# Altium schematic symbol library Connector.SchLib: 208 symbols (part 4 of 4)
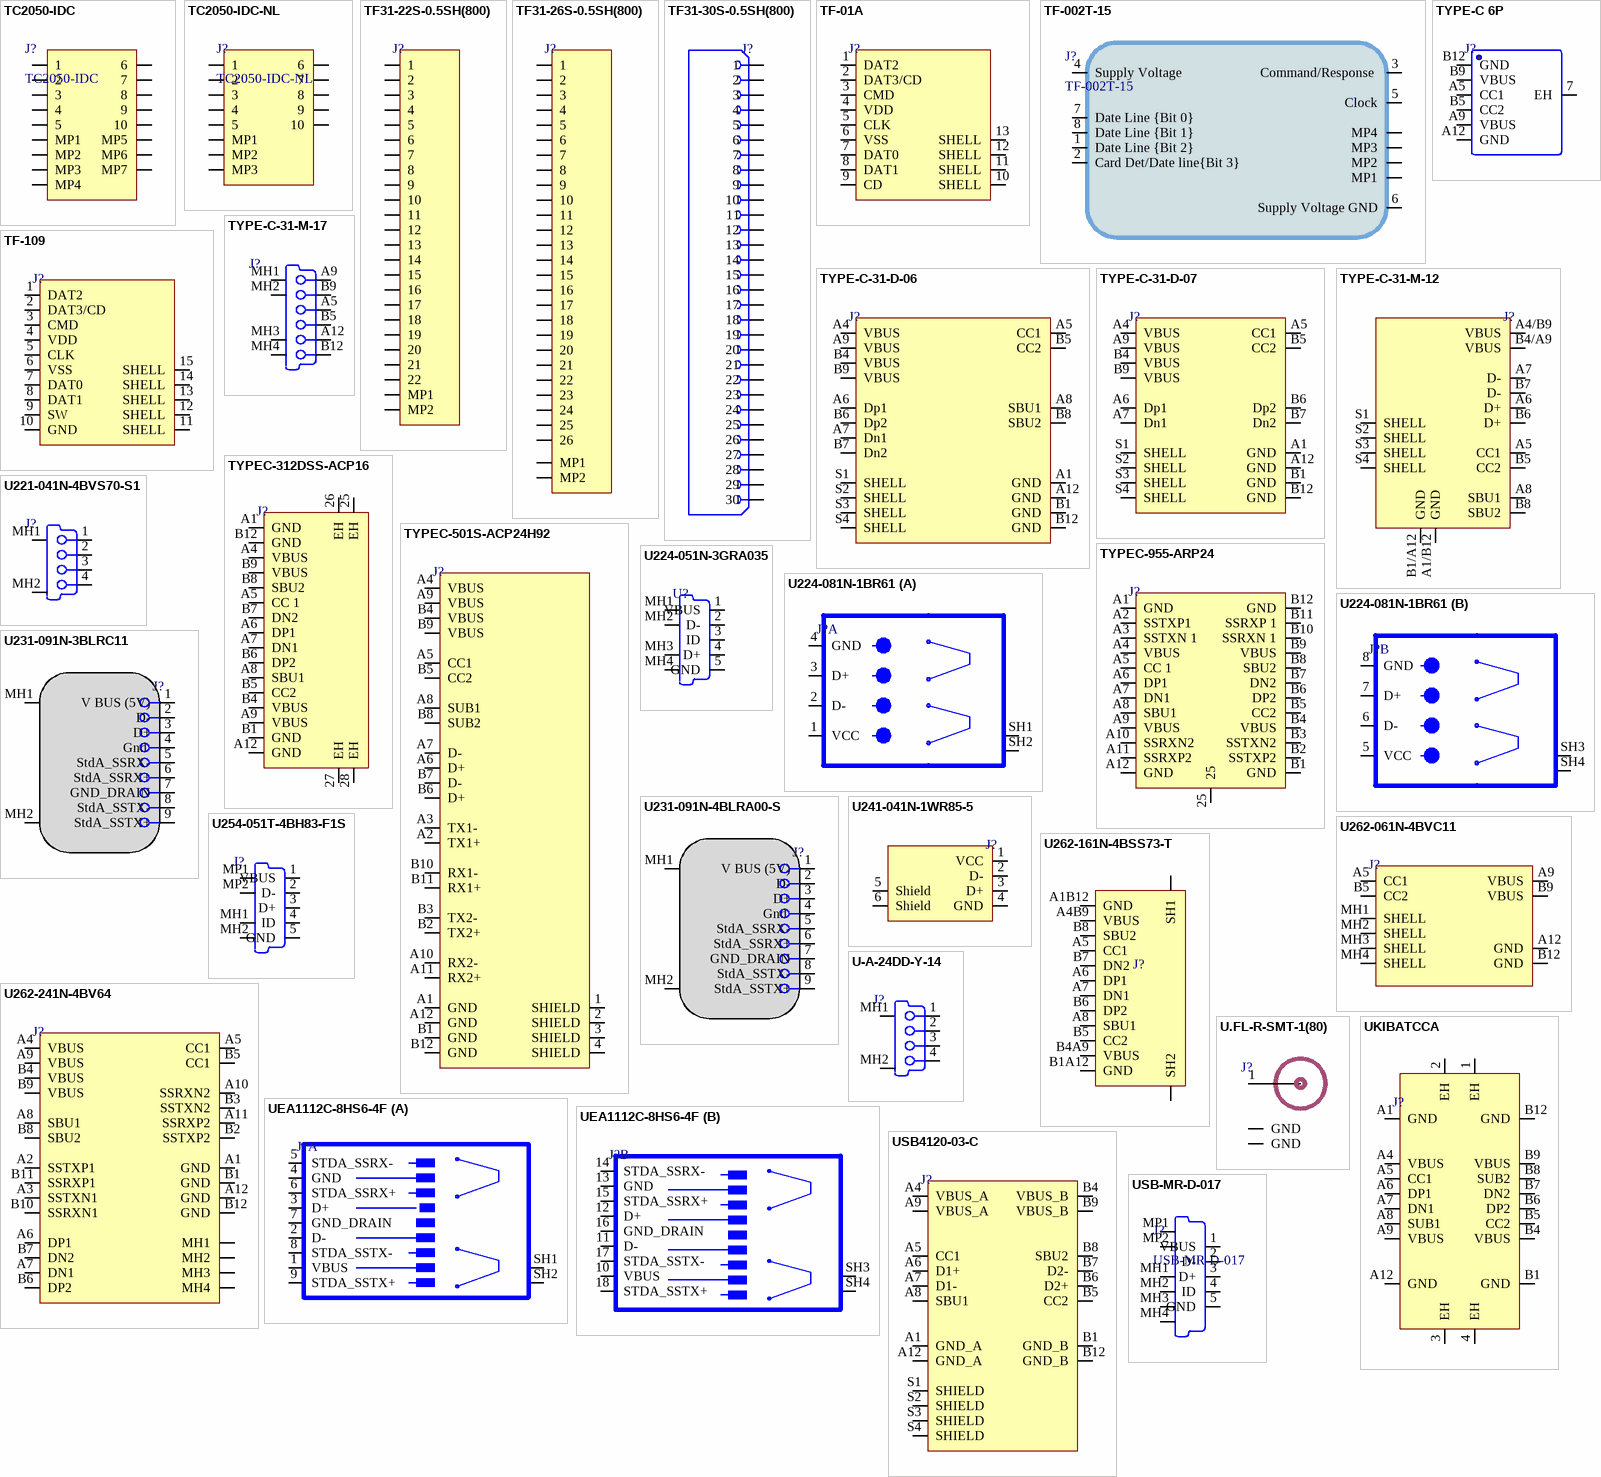
[diagram p11: symbols TC2050-IDC to USB-MR-D-017]

## TYPEC-312DSS-ACP16
designator J?
USB 3.1 5A 1 260℃ Surface Mount 16P Female -45℃~+85℃ Type-C SMD USB Connectors ROHS; Manufacturer: XUNPU; Manufacturer Part Number: TYPEC-312DSS-ACP16; Package: Custom; LCSC Part Number: C2909601; Item Type: Type-C SMD USB; ComponentLink1Description: LCSC; ComponentLink1URL: https://www.lcsc.com/product-detail/USB-Connectors_XUNPU-TYPEC-312DSS-ACP16_C2909601.html
footprint TYPEC-312DSS-ACP16
pins: 25 EH, 26 EH, 27 EH, 28 EH, A1 GND, A4 VBUS, A5 CC 1, A6 DP1, A7 DN1, A8 SBU1, A9 VBUS, A12 GND, B1 GND, B4 VBUS, B5 CC2, B6 DP2, B7 DN2, B8 SBU2, B9 VBUS, B12 GND

## TYPEC-501S-ACP24H92
designator J?
5A USB 3.1 1 260℃ Brick nogging 24P Female -45℃~+85℃ Type-C SMD USB Connectors ROHS; Manufacturer: XUNPU; Manufacturer Part Number: TYPEC-501S-ACP24H92; Package: SMD; LCSC Part Number: C2840394; Item Type: Type-C SMD USB Connector; ComponentLink1Description: LCSC; ComponentLink1URL: https://www.lcsc.com/product-detail/USB-Connectors_XUNPU-TYPEC-501S-ACP24H92_C2840394.html
footprint TYPEC-501S-ACP24H92
pins: 1 SHIELD, 2 SHIELD, 3 SHIELD, 4 SHIELD, A1 GND, A2 TX1+, A3 TX1-, A4 VBUS, A5 CC1, A6 D+, A7 D-, A8 SUB1, A9 VBUS, A10 RX2-, A11 RX2+, A12 GND, B1 GND, B2 TX2+, B3 TX2-, B4 VBUS, B5 CC2, B6 D+, B7 D-, B8 SUB2, B9 VBUS, B10 RX1-, B11 RX1+, B12 GND

## TYPEC-955-ARP24
designator J?
USB 3.1 3A 1 260℃ Board Edge, Straddle Mount 24P Male -25℃~+85℃ Type-C SMD USB Connectors ROHS; Manufacturer: XUNPU; Manufacturer Part Number: TYPEC-955-ARP24; Item Type: Type-C Connector; Package: SMD; LCSC Part Number: C2895018
footprint TYPEC-955-ARP24
pins: 25, A1 GND, A2 SSTXP1, A3 SSTXN 1, A4 VBUS, A5 CC 1, A6 DP1, A7 DN1, A8 SBU1, A9 VBUS, A10 SSRXN2, A11 SSRXP2, A12 GND, B1 GND, B2 SSTXP2, B3 SSTXN2, B4 VBUS, B5 CC2, B6 DP2, B7 DN2, B8 SBU2, B9 VBUS, B10 SSRXN 1, B11 SSRXP 1, B12 GND

## U221-041N-4BVS70-S1
designator J?
1A USB 2.0 1 235℃ Surface Mount 4 Female -20℃~+85℃ Gold Copper Alloy Type-A SMD USB Connectors ROHS; Manufacturer: XKB Connectivity; Manufacturer Part Number: U221-041N-4BVS70-S1; Supplier 1: LCSC; RoHS: No; Category: Uncategorized; Supplier Part Number 1: C2942998; ComponentLink1Description: LCSC; ComponentLink1URL: https://www.lcsc.com/product-detail/USB-Connectors_XKB-Connectivity-U221-041N-4BVS70-S1_C2942998.html; LCSC Part Number: C2942998
footprint U221-041N-4BVS70-S1_
pins: 1 VBUS, 2 D- "USB Data - [White]", 3 D+ "USB Data + [Green]", 4 GND, MH1 Tab "Shell", MH2 Tab "Shell"

## U224-051N-3GRA035
designator U?
USB 2.0 5A 1 235℃ Sink board 4 Female -25℃~+85℃ Gold Copper Alloy Type-A Plugin USB Connectors ROHS; Manufacturer: XKB Connectivity; Manufacturer Part Number: U224-051N-3GRA035; Package: Plugin; LCSC Part Number: C2689740; Item Type: USB Connector; ComponentLink1Description: LCSC; ComponentLink1URL: https://www.lcsc.com/product-detail/USB-Connectors_XKB-Connectivity-U224-051N-3GRA035_C2689740.html
footprint U224-051N-3GRA035
pins: 1 VBUS, 2 D- "USB Data - [White]", 3 ID "USB Data + [Green]", 4 D+, 5 GND, MH1 Tab "Shell", MH2 Tab "Shell", MH3 Tab "Shell", MH4 Tab "Shell"

## U224-081N-1BR61
designator J?
USB 2.0 1.5A 2 235℃ Right-Angle 4P+4P Female -40℃~+85℃ Gold Brass Type-A Plugin USB Connectors ROHS; Manufacturer: XKB Connection; Manufacturer Part Number: U224-081N-1BR61; Item Type: Type-A USB Connector; Package: Plugin; LCSC Part Number: C908455; ComponentLink1Description: LCSC; ComponentLink1URL: https://www.lcsc.com/product-detail/USB-Connectors_XKB-Connection-U224-081N-1BR61_C908455.html
footprint U224-081N-1BR61
part A pins: 1 VCC, 2 D-, 3 D+, 4 GND, SH1 GND "Shell", SH2 GND "Shell"
part B pins: 5 VCC, 6 D-, 7 D+, 8 GND, SH3 GND "Shell", SH4 GND "Shell"

## U231-091N-3BLRC11
designator J?
USB 3.0 3A 1 235℃ Shrouded 9 Female -40℃~+85℃ Gold Brass Type-A Plugin USB Connectors ROHS; Manufacturer: XKB Connectivity; Manufacturer Part Number: U231-091N-3BLRC11; Package: Plugin; LCSC Part Number: C2880594; Item Type: USB Connector; ComponentLink1Description: LCSC; ComponentLink1URL: https://www.lcsc.com/product-detail/span-style-background-color-ff0-USB-span-span-style-background-color-ff0-Connectors-span_XKB-Connectivity-U231-091N-3BLRC11_C2880594.html
footprint U231-091N-3BLRC11
pins: 1 V BUS (5V) "USB Vcc [Red]", 2 D- "USB Data - [White]", 3 D+ "USB Data + [Green]", 4 Gnd  "Ground for Power Button", 5 StdA_SSRX- "SUPERSPEED RECEIVER DIFFERENTIAL PAIR", 6 StdA_SSRX+ "SUPERSPEED RECEIVER DIFFERENTIAL PAIR", 7 GND_DRAIN "GROUND FOR SIGNAL RETURN", 8 StdA_SSTX- "SUPERSPEED TRANSMITTER DIFFERENTIAL PAIR", 9 StdA_SSTX+ "SUPERSPEED TRANSMITTER DIFFERENTIAL PAIR", MH1 Tab "Shell", MH2 Tab "Shell"

## U231-091N-4BLRA00-S
designator J?
USB 3.0 1.8A 1 260℃ Surface Mount 9 Female -40℃~+85℃ Gold Copper Alloy Type-A SMD USB Connectors ROHS; Manufacturer: XKB Connectivity; Manufacturer Part Number: U231-091N-4BLRA00-S; Footprint: Custom; ComponentLink1Description: LCSC; ComponentLink1URL: https://lcsc.com/product-detail/USB-Connectors_XKB-Connectivity-U231-091N-4BLRA00-S_C2880618.html; LCSC Part Number: C2880618
footprint U231-091N-4BLRA00-S_ (USB 3.0 1 Surface Mount 9 Female -40?~+85? Type-A SMD USB Connectors ROHS)
pins: 1 V BUS (5V) "USB Vcc [Red]", 2 D- "USB Data - [White]", 3 D+ "USB Data + [Green]", 4 Gnd  "Ground for Power Button", 5 StdA_SSRX- "SUPERSPEED RECEIVER DIFFERENTIAL PAIR", 6 StdA_SSRX+ "SUPERSPEED RECEIVER DIFFERENTIAL PAIR", 7 GND_DRAIN "GROUND FOR SIGNAL RETURN", 8 StdA_SSTX- "SUPERSPEED TRANSMITTER DIFFERENTIAL PAIR", 9 StdA_SSTX+ "SUPERSPEED TRANSMITTER DIFFERENTIAL PAIR", MH1 Tab "Shell", MH2 Tab "Shell"

## U241-041N-1WR85-5
designator J?
1.5A USB 2.0 1 235℃ Bend insert 4P Female -40℃~+85℃ Gold Brass Type-B Plugin USB Connectors ROHS; Manufacturer: XKB Connection; Manufacturer Part Number: U241-041N-1WR85-5; Item Type: USB B Connector; Package: Plugin; LCSC Part Number: C388656; ComponentLink1Description: LCSC; ComponentLink1URL: https://www.lcsc.com/product-detail/span-style-background-color-ff0-USB-span-Connectors_XKB-Connection-U241-041N-1WR85-5_C388656.html
footprint U241-041N-1WR85-5
pins: 1 VCC, 2 D-, 3 D+, 4 GND, 5 Shield, 6 Shield

## U254-051T-4BH83-F1S
designator J?
1.8A USB 2.0 1 260℃ Surface Mount 5P Female -40℃~+85℃ Gold Copper Alloy Micro-B SMD USB Connectors ROHS; Manufacturer Part Number: U254-051T-4BH83-F1S; Manufacturer: XKB; LCSC Part Number: C397452; Package: SMD; ComponentLink1Description: LCSC; ComponentLink1URL: https://www.lcsc.com/product-detail/USB-Connectors_XKB-Connectivity-U254-051T-4BH83-F1S_C397452.html; Item Type: USB Connector
footprint U254-051T-4BH83-F1S
pins: 1 VBUS, 2 D- "USB Data - [White]", 3 D+, 4 ID "USB Data + [Green]", 5 GND, MH1 Tab "Shell", MH2 Tab "Shell", MP1 Tab "Shell", MP2 Tab "Shell"

## U262-061N-4BVC11
designator J?
USB 3.1 1 Surface Mount 6 Female -25℃~+85℃ Type-C SMD USB Connectors ROHS; Manufacturer: XKB; Manufacturer Part Number: U262-061N-4BVC11; Footprint: Custom; ComponentLink1Description: LCSC; ComponentLink1URL: https://www.lcsc.com/product-detail/span-style-background-color-ff0-USB-span-Connectors_XKB-Connectivity-U262-061N-4BVC11_C2764612.html; LCSC Part Number: C2764612; Item Type: USB Connector
footprint U262-061N-4BVC11
pins: A5 CC1 (power), A9 VBUS (power), A12 GND, B5 CC2 (power), B9 VBUS (power), B12 GND, MH1 SHELL, MH2 SHELL, MH3 SHELL, MH4 SHELL

## U262-161N-4BSS73-T
designator J?
3A USB 3.1 1 260℃ Surface Mount 16P Female -25℃~+80℃ Gold Copper Alloy Type-C SMD USB Connectors ROHS; Manufacturer: XKB Connectivity; Manufacturer Part Number: U262-161N-4BSS73-T; Package: Custom; LCSC Part Number: C2942996; ComponentLink1Description: LCSC; ComponentLink1URL: https://www.lcsc.com/product-detail/USB-Connectors_XKB-Connectivity-U262-161N-4BSS73-T_C2942996.html; Item Type: Type-C SMD USB Connector
footprint U262-161N-4BSS73-T
pins: A1B12 GND, A4B9 VBUS, A5 CC1, A6 DP1, A7 DN1, A8 SBU1, B1A12 GND, B4A9 VBUS, B5 CC2, B6 DP2, B7 DN2, B8 SBU2, SH1, SH2

## U262-241N-4BV64
designator J?
5A USB 3.1 1 260℃ Surface Mount 24 Female Copper Alloy Type-C SMD USB Connectors ROHS; Manufacturer: XKB Connectivity; Manufacturer Part Number: U262-241N-4BV64; Package: Custom; LCSC Part Number: C388660; ComponentLink1Description: LCSC; ComponentLink1URL: https://www.lcsc.com/product-detail/span-style-background-color-ff0-USB-span-Connectors_XKB-Connectivity-U262-241N-4BV64_C388660.html
footprint U262-241N-4BV64_
pins: A1 GND, A2 SSTXP1, A3 SSTXN1, A4 VBUS, A5 CC1, A6 DP1, A7 DN1, A8 SBU1, A9 VBUS, A10 SSRXN2, A11 SSRXP2, A12 GND, B1 GND, B2 SSTXP2, B3 SSTXN2, B4 VBUS, B5 CC1, B6 DP2, B7 DN2, B8 SBU2, B9 VBUS, B10 SSRXN1, B11 SSRXP1, B12 GND, MH1, MH2, MH3, MH4

## U-A-24DD-Y-14
designator J?
USB 2.0 3A 1 Shrouded 4 Female Type-A Plugin USB Connectors ROHS; Manufacturer: Korean Hroparts Elec; Manufacturer Part Number: U-A-24DD-Y-14; Item Type: USB A Connector; Package: Plugin; LCSC Part Number: C2689985; ComponentLink1Description: LCSC; ComponentLink1URL: https://www.lcsc.com/product-detail/USB-Connectors_Korean-Hroparts-Elec-U-A-24DD-Y-14_C2689985.html
footprint U-A-24DD-Y-14
pins: 1 VBUS, 2 D- "USB Data - [White]", 3 D+ "USB Data + [Green]", 4 GND, MH1 Tab "Shell", MH2 Tab "Shell"

## U.FL-R-SMT-1(80)
designator J?
CONN U.FL RCPT STR 50 OHM SMD; Manufacturer: Hirose; Manufacturer Part Number: U.FL-R-SMT-1(80); Item Type: UFL Connector; Supplier 1: Future Electronics; Stock 1: 1272; Pricing 1: 1=1.07, 500=0.785, 1500=0.74, 2500=0.72, 5000=0.695 (USD); Case/Package: SMD/SMT; Package Quantity: 10000; Packaging: Tape and Reel; Lead Free: Lead Free; ComponentLink1URL: https://www.hirose.com/product/en/download_file/key_name/U.FL-R-SMT-1%2880%29/category/Specification%20Sheet/doc_file_id/37638/?file_category_id=9&item_id=03310472280&is_series=&src-supplier=Digi-Key; ComponentLink1Description: https://www.hirose.com/product/en/download_file/key_name/U.FL-R-SMT-1%2880%29/category/Specification%20Sheet/doc_file_id/37638/?file_category_id=9&item_id=03310472280&is_series=&src-supplier=Digi-Key; ComponentLink2URL: http://www.mouser.com/ds/2/185/U.FL_catalog-939761.pdf?src-supplier=Mouser; ComponentLink2Description: http://www.mouser.com/ds/2/185/U.FL_catalog-939761.pdf?src-supplier=Mouser; Supplier Part Number 1: U.FL-R-SMT-1(80)-CUTT; LCSC Part Number: C88374
footprint U.FL-R-SMT-1(80)_
pins: 1 RF_IN, 2 GND, 3 GND

## UEA1112C-8HS6-4F
designator J?
USB 3.0 2 Right-Angle 9P+9P Female Type-A Plugin USB Connectors ROHS; Manufacturer: FOXCONN; Manufacturer Part Number: UEA1112C-8HS6-4F; Item Type: Type-A Connector; Package: Plugin; LCSC Part Number: C225759; ComponentLink1Description: LCSC; ComponentLink1URL: https://www.lcsc.com/product-detail/USB-Connectors_FOXCONN-UEA1112C-8HS6-4F_C225759.html
footprint UEA1112C-8HS6-4F
part A pins: 1 VBUS, 2 D-, 3 D+, 4 GND, 5 STDA_SSRX-, 6 STDA_SSRX+, 7 GND_DRAIN, 8 STDA_SSTX-, 9 STDA_SSTX+, SH1 GND "Shell", SH2 GND "Shell"
part B pins: 10 VBUS, 11 D-, 12 D+, 13 GND, 14 STDA_SSRX-, 15 STDA_SSRX+, 16 GND_DRAIN, 17 STDA_SSTX-, 18 STDA_SSTX+, SH3 GND "Shell", SH4 GND "Shell"

## UKIBATCCA
designator J?
5A 1 Horizontal attachment 16P Female -25℃~+85℃ Type-C SMD USB Connectors ROHS; Manufacturer: SAMZO; Manufacturer Part Number: UKIBATCCA; Item Type: USB Type-C Connector; Package: SMD; LCSC Part Number: C29780877; ComponentLink1Description: LCSC; ComponentLink1URL: https://www.lcsc.com/product-detail/span-style-background-color-ff0-USB-span-Connectors_SAMZO-UKIBATCCA_C29780877.html
footprint UKIBATCCA
pins: 1 EH, 2 EH, 3 EH, 4 EH, A1 GND, A4 VBUS, A5 CC1, A6 DP1, A7 DN1, A8 SUB1, A9 VBUS, A12 GND, B1 GND, B4 VBUS, B5 CC2, B6 DP2, B7 DN2, B8 SUB2, B9 VBUS, B12 GND

## USB4120-03-C
designator J?
CONN RCPT USB2.0 TYP C 24POS SMD; Manufacturer: Global Connector Technology; Manufacturer Part Number: USB4120-03-C; Item Type: Connector; Supplier: Future Electronics; Supplier Part Number: 2142143; RoHS: No; Category: Connectors; Stock: 600; Pricing: 600=0.545, 1200=0.53, 1800=0.525, 2400=0.52, 3000=0.5 (USD); ComponentLink1URL: https://datasheet.octopart.com/USB4120-03-C-Global-Connector-Technology-datasheet-169246750.pdf?src-supplier=Future+Electronics; ComponentLink1Description: https://datasheet.octopart.com/USB4120-03-C-Global-Connector-Technology-datasheet-169246750.pdf?src-supplier=Future+Electronics; ComponentLink2URL: https://datasheet.octopart.com/USB4120-03-C-GCT-datasheet-166929325.pdf?src-supplier=TME; ComponentLink2Description: https://datasheet.octopart.com/USB4120-03-C-GCT-datasheet-166929325.pdf?src-supplier=TME
footprint USB4120-03-C
pins: A1 GND_A, A4 VBUS_A, A5 CC1, A6 D1+, A7 D1-, A8 SBU1, A9 VBUS_A, A12 GND_A, B1 GND_B, B4 VBUS_B, B5 CC2, B6 D2+, B7 D2-, B8 SBU2, B9 VBUS_B, B12 GND_B, S1 SHIELD, S2 SHIELD, S3 SHIELD, S4 SHIELD

## USB-MR-D-017
designator J?
2A 1 Surface Mount 5P Female Micro-B SMD USB Connectors ROHS; Manufacturer: DEALON; Manufacture Part no: USB-MR-D-017; Package: SMD; LCSC Part no: C2926988; Item Type: USB; ComponentLink1Description: LCSC; ComponentLink1URL: https://www.lcsc.com/product-detail/span-style-background-color-ff0-USB-span-Connectors_DEALON-USB-MR-D-017_C2926988.html
footprint USB-MR-D-017
pins: 1 VBUS, 2 D- "USB Data - [White]", 3 D+ "USB Data + [Green]", 4 ID, 5 GND, MH1 Tab "Shell", MH2 Tab "Shell", MH3 Tab "Shell", MH4 Tab "Shell", MP1 Tab "Shell", MP2 Tab "Shell"

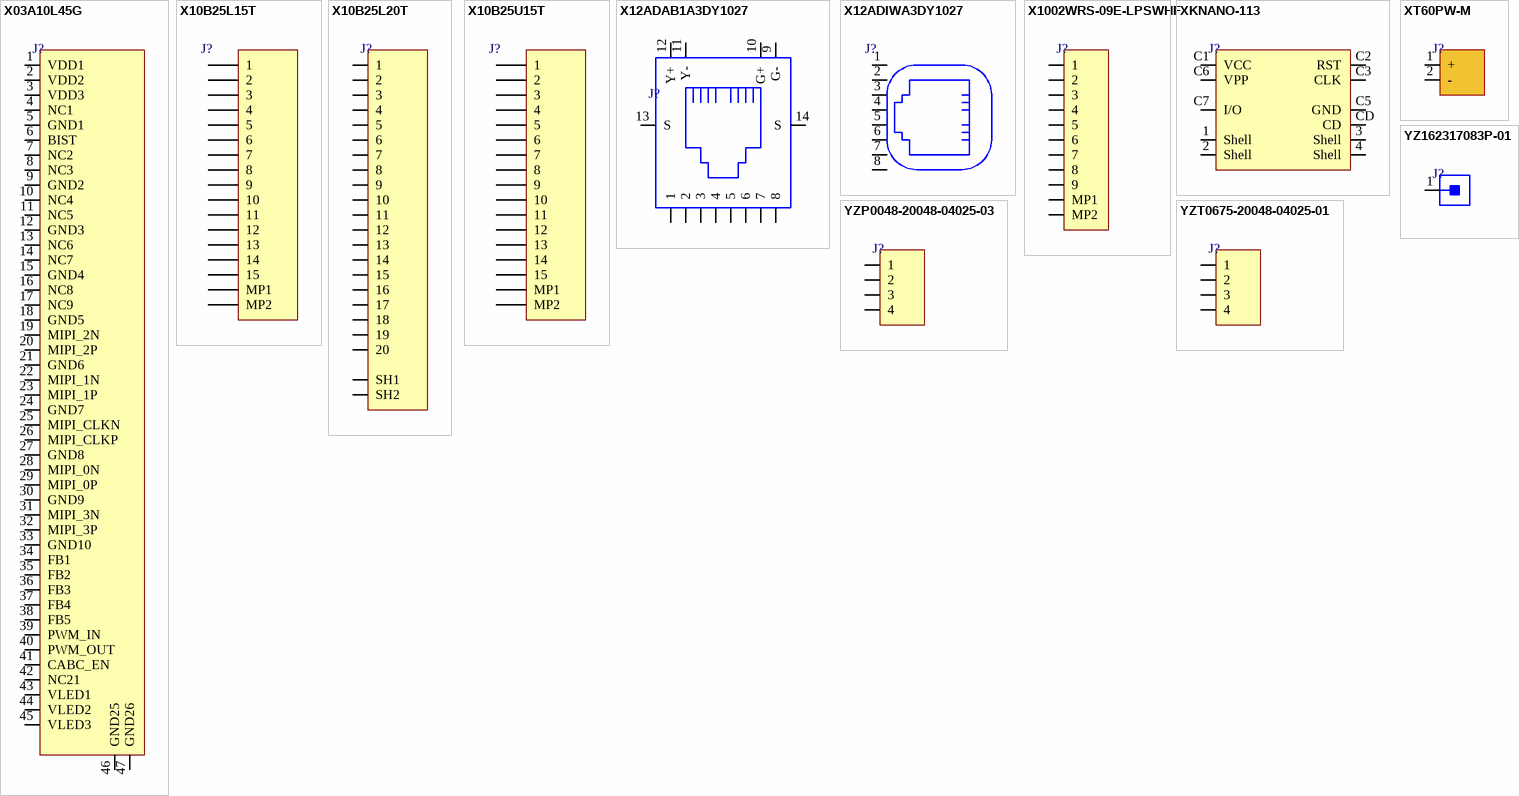
[diagram p8: symbols X03A10L45G to YZT0675-20048-04025-01]

## X03A10L45G
designator J?
-25℃~+85℃ Clamshell 45P Bottom Contact Surface Mount，Right Angle 0.3mm 260℃ SMD,P=0.3mm,Surface Mount，Right Angle FFC/FPC Connectors ROHS; Manufacturer: XKB Connection; Manufacturer Part Number: X03A10L45G; Package: SMD,P=0.3mm,Surface Mount，Right Angle; LCSC Part Number: C519257; Item Type: FFC/FPC Connector; ComponentLink1Description: LCSC; ComponentLink1URL: https://www.lcsc.com/product-detail/FFC-span-style-background-color-ff0-FPC-span-Connectors_XKB-Connection-X03A10L45G_C519257.html
footprint X03A10L45G
pins: 1 VDD1, 2 VDD2, 3 VDD3, 4 NC1, 5 GND1, 6 BIST, 7 NC2, 8 NC3, 9 GND2, 10 NC4, 11 NC5, 12 GND3, 13 NC6, 14 NC7, 15 GND4, 16 NC8, 17 NC9, 18 GND5, 19 MIPI_2N, 20 MIPI_2P, 21 GND6, 22 MIPI_1N, 23 MIPI_1P, 24 GND7, 25 MIPI_CLKN, 26 MIPI_CLKP, 27 GND8, 28 MIPI_0N, 29 MIPI_0P, 30 GND9, 31 MIPI_3N, 32 MIPI_3P, 33 GND10, 34 FB1, 35 FB2, 36 FB3, 37 FB4, 38 FB5, 39 PWM_IN, 40 PWM_OUT, 41 CABC_EN, 42 NC21, 43 VLED1, 44 VLED2, 45 VLED3, 46 GND25, 47 GND26

## X10B25L15T
designator J?
Slide Lock 15 Bottom Contact Surface Mount 1mm 260℃ SMD,P=1mm FFC/FPC Connectors ROHS; Manufacturer: XKB Connectivity; Manufacturer Part Number: X10B25L15T; Item Type: FFC Connector; Package: Custom; LCSC Part Number: C500174; ComponentLink1Description: LCSC; ComponentLink1URL: https://www.lcsc.com/product-detail/FFC-FPC-Connectors_XKB-Connectivity-X10B25L15T_C500174.html
footprint X10B25L15T_
pins: 1, 2, 3, 4, 5, 6, 7, 8, 9, 10, 11, 12, 13, 14, 15, MP1, MP2

## X10B25L20T
designator J?
-40℃~+85℃ Slide Lock 20P Bottom Contact Surface Mount，Right Angle 1mm 260℃ SMD,P=1mm,Surface Mount，Right Angle FFC/FPC Connectors ROHS; Manufacturer: XKB Connectivity; Manufacturer Part Number: X10B25L20T; Item Type: FFC Connector; Package: Custom; LCSC Part Number: C500179; ComponentLink1Description: LCSC; ComponentLink1URL: https://www.lcsc.com/product-detail/FFC-FPC-Connectors_XKB-Connection-X10B25L20T_C500179.html
footprint X10B25L20T
pins: 1, 2, 3, 4, 5, 6, 7, 8, 9, 10, 11, 12, 13, 14, 15, 16, 17, 18, 19, 20, SH1, SH2

## X10B25U15T
designator J?
Contact,Top 15 0.039"（1.00mm） 0.098"（2.50mm） Slide Lock SMD FFC, FPC Connectors RoHS; Maunfacturer Part Number: X10B25U15T; Manufacturer: XKB Connectivity; ComponentLink1Description: LCSC; ComponentLink1URL: https://www.lcsc.com/product-detail/FFC-FPC-Connectors_XKB-Connectivity-X10B25U15T_C500193.html; LCSC Part Number: C500193; Item Type: FPC Connector
footprint X10B25U15T_
pins: 1, 2, 3, 4, 5, 6, 7, 8, 9, 10, 11, 12, 13, 14, 15, MP1, MP2

## X12ADAB1A3DY1027
designator J?
RJ45 RJReceptacle 1 有屏蔽 Right-Angle 260℃ Gold Phosphor bronze WithLED -40℃~+85℃ Plugin Ethernet Connectors/Modular Connectors (RJ45 RJ11) ROHS; Manufacturer: XKB Connectivity; Manufacturer Part Number: X12ADAB1A3DY1027; Supplier: LCSC; LCSC Part Number: C2916459; RoHS: No; Item Type: Connectors (RJ45 RJ11)
footprint X12ADAB1A3DY1027
pins: 1, 2, 3, 4, 5, 6, 7, 8, 9 G-, 10 G+, 11 Y-, 12 Y+, 13 S, 14 S

## X12ADIWA3DY1027
designator J?
RJ45Receptacle Unshielded 1 Bend insert 260℃ Gold Phosphor Bronze Without LED -40℃~+85℃ Plugin Ethernet Connectors / Modular Connectors (RJ45 RJ11) ROHS; Manufacturer: XKB Connection; Manufacturer Part Number: X12ADIWA3DY1027; Package: Plugin; LCSC Part Number: C2916460; Item Type: Connectors (RJ45 RJ11); ComponentLink1Description: LCSC; ComponentLink1URL: https://www.lcsc.com/product-detail/Ethernet-Connectors-Modular-Connectors-RJ45-RJ11_XKB-Connection-X12ADIWA3DY1027_C2916460.html
footprint X12ADIWA3DY1027
pins: 1, 2, 3, 4, 5, 6, 7, 8

## X1002WRS-09E-LPSWHF
designator J?
1x9P 1 Tin 1mm male 9 260℃ -25℃~+85℃ Brass 1A Surface Mount SMD,P=1mm Wire To Board / Wire To Wire Connector ROHS; Manufacturer: XKB Connectivity; Manufacturer Part Number: X1002WRS-09E-LPSWHF; Package: SMD,P=1mm; LCSC Part Number: C437069; Item Type: Board / Wire To Wire Connector; ComponentLink1Description: LCSC; ComponentLink1URL: https://www.lcsc.com/product-detail/Wire-To-Board-Wire-To-Wire-Connector_XKB-Connectivity-X1002WRS-09E-LPSWHF_C437069.html
footprint X1002WRS-09E-LPSWHF
pins: 1, 2, 3, 4, 5, 6, 7, 8, 9, MP1, MP2

## XKNANO-113
designator J?
Copper Alloy Self bomb Gold plating 1.25mm Deck -40℃~+85℃ 260℃ NanoSIM SMD SIM Card Connectors ROHS; Manufacturer: XKB Connectivity; Manufacturer Part Number: XKNANO-113; Package: SMD Custom; LCSC Part Number: C381071; Item Type: SIM Card Connectors; ComponentLink1Description: LCSC; ComponentLink1URL: https://www.lcsc.com/product-detail/SIM-Card-Connectors_XKB-Connectivity-XKNANO-113_C381071.html
footprint XKNANO-113
pins: 1 Shell, 2 Shell, 3 Shell, 4 Shell, C1 VCC, C2 RST, C3 CLK, C5 GND, C6 VPP, C7 I/O, CD

## XT60PW-M
designator J?
Power Connectors ROHS; Manufacturer: Changzhou Amass Elec; Manufacturer Part Number: XT60PW-M; Package: Custom; LCSC Part Number: C98732; Item Type: Connector; ComponentLink1Description: LCSC; ComponentLink1URL: https://jlcpcb.com/partdetail/Changzhou_AmassElec-XT60PWM/C98732
footprint XT60PW-M
pins: 1 +, 2 -

## YZ162317083P-01
designator J?
Brass 12V -40℃~+85℃ 单PINBit 弹簧顶针(POGO PIN) 8.3mm 50mΩ 10000次 4.28mm 2A Gold - Pogo Pin Spring Probe Connector ROHS; Manufacturer: Xinyangze; Manufacturer Part Number: YZ162317083P-01; Package: -; LCSC Part Number: C5157268; Item Type: Pogo Pin Spring Probe Connector; ComponentLink1Description: LCSC; ComponentLink1URL: https://www.lcsc.com/product-detail/Pogo-Pin-Spring-Probe-Connector_Xinyangze-YZ162317083P-01_C5157268.html
footprint YZ162317083P-01
pins: 1

## YZP0048-20048-04025-03
designator J?
Brass 2.5mm 12V -20℃~+70℃ 磁吸弹簧顶针公座 4.8mm 四PINBit 50mΩ 10000次 3.1mm 1A Gold - Thimble/Copper Rod/Test Ring ROHS; Manufacturer: Xinyangze; Manufacturer Part Number: YZP0048-20048-04025-03; Item Type: Pogo Pin Connector; Package: Custom; LCSC Part Number: C5126845; ComponentLink1Description: LCSC; ComponentLink1URL: https://www.lcsc.com/product-detail/Thimble-Copper-Rod-Test-Ring_Xinyangze-YZP0048-20048-04025-03_C5126845.html
footprint YZP0048-20048-04025-03
pins: 1, 2, 3, 4

## YZT0675-20048-04025-01
designator J?
Brass 2.5mm -20℃~+70℃ 4.8mm 四PINBit 50mΩ 10000次 Gold - Thimble/Copper Rod/Test Ring ROHS; Manufacturer: Xinyangze; Manufacturer Part Number: YZT0675-20048-04025-01; Item Type: Pogo Pin Connector; Package: Custom; LCSC Part Number: C5126846; ComponentLink1Description: LCSC; ComponentLink1URL: https://www.lcsc.com/product-detail/Thimble-Copper-Rod-Test-Ring_Xinyangze-YZT0675-20048-04025-01_C5126846.html
footprint YZT0675-20048-04025-01
pins: 1, 2, 3, 4